# Altium footprint library Adafruit_MiniBoost.PcbLib: 1 footprints
Each footprint in its own frame and in the unit in brackets; x right, y up, seen from the top. Pads: shape width x height; smd on the part's side, far side on the other; paste and mask are expansions set on the pad; w line width, h text height; cw(c..) or ccw(c..) is an arc to the next point about the centre after c.
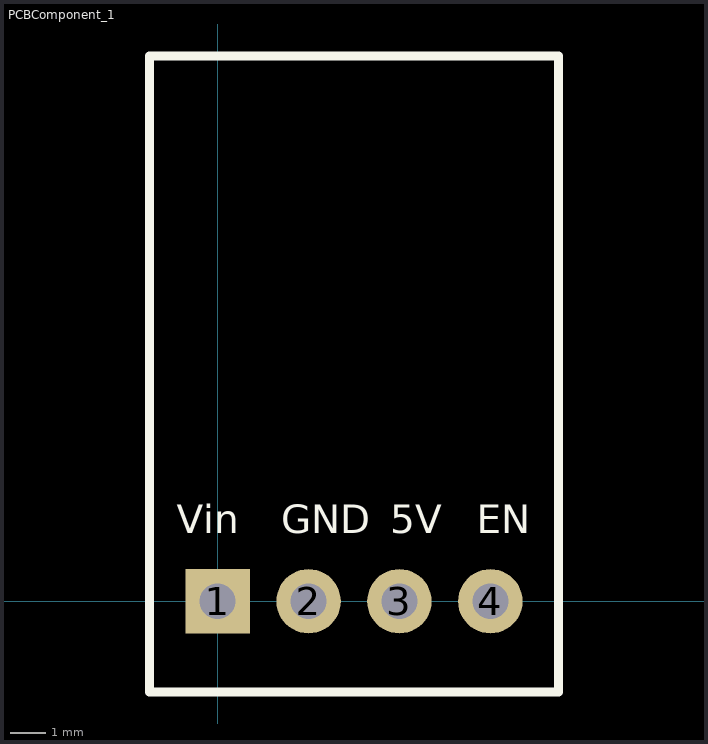
[diagram p0: the footprint, top view; thin cyan lines are the x and y axes]

## PCBComponent_1 [mm]
pads (4):
  rect 1.8x1.8 / inner rrect50% 1.8x1.8 / far side rrect50% 1.8x1.8 hole 1: 1(0,0)
  round 1.8 hole 1: 2(2.54,0) 3(5.08,0) 4(7.62,0)
Top Overlay:
  lines w0.254: -1.905,-2.54 -1.905,-0.127 -1.905,15.24 9.525,15.24 9.525,-2.54 -1.905,-2.54
  text "Vin" at -1.143,1.905 h0.8
  text "5V" at 4.826,1.905 h0.8
  text "GND" at 1.778,1.905 h0.8
  text "EN" at 7.239,1.905 h0.8